# Altium schematic symbol library Altium_Library.SchLib: 822 symbols (part 11 of 17)
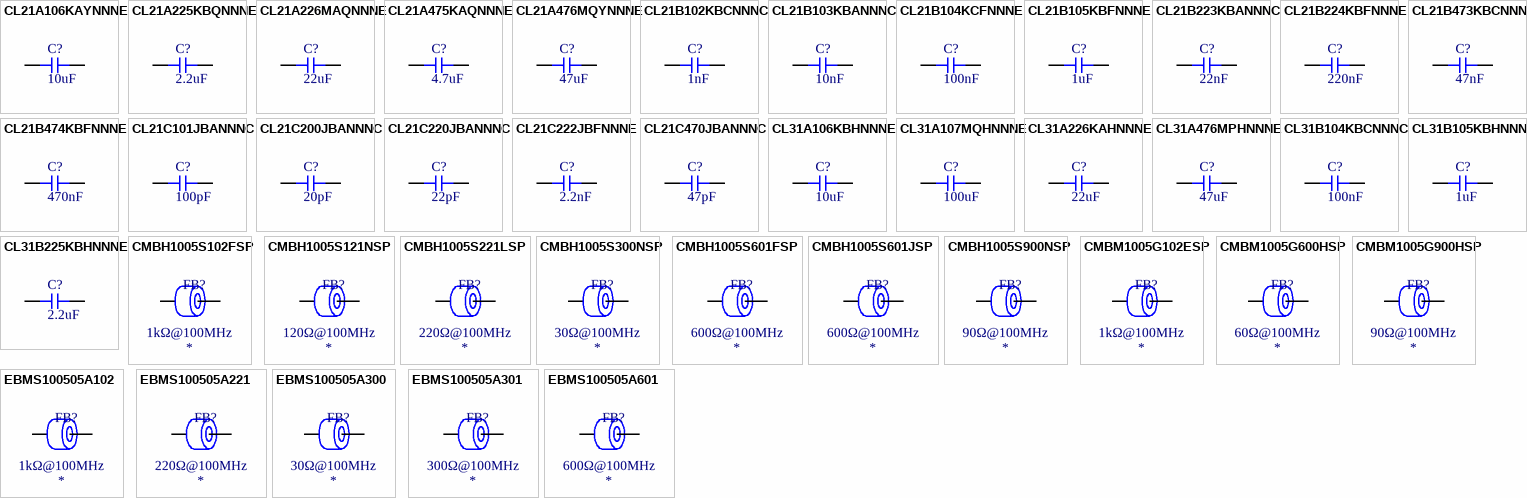
[diagram p30: symbols CL21A106KAYNNNE to EBMS100505A601]

## EBMS100505A102
designator FB?  Impedance @ Frequency: 1kΩ@100MHz
Ferrite, 1kΩ@100MHz, ±25%, 1Ω, 200mA, SMD 0402; Manufacturer: HYHONGYEX; Manufacturer Part Number: EBMS100505A102; Package Size: 0402; JLCPCB Basic Part: No; JLCPCB Part Number: C963843; Supplier 1: LCSC; Category: Ferrite Beads; Supplier Part Number 1: C963843; Tolerance: ±25%; Rated Current: 200mA; DC Resistance: 1Ω; RoHS: Yes; ComponentLink1Description: Datasheet; ComponentLink1URL: https://wmsc.lcsc.com/wmsc/upload/file/pdf/v2/lcsc/2304140030_HYHONGYEX-EBMS100505A102_C963843.pdf; ComponentLink2Description: JLCPCB Part URL; ComponentLink2URL: https://jlcpcb.com/partdetail/C963843; ComponentLink3Description: LCSC Part URL; ComponentLink3URL: https://lcsc.com/product-detail/Ferrite-Beads_HYHONGYEX-HYHONGYEX-EBMS100505A102_C963843.html
footprint FB-0402 (0402 (1005M) Ferrite)
pins: 1, 2

## EBMS100505A221
designator FB?  Impedance @ Frequency: 220Ω@100MHz
Ferrite, 220Ω@100MHz, ±25%, 700mΩ, 300mA, SMD 0402; Manufacturer: HYHONGYEX; Manufacturer Part Number: EBMS100505A221; Package Size: 0402; JLCPCB Basic Part: No; JLCPCB Part Number: C963840; Supplier 1: LCSC; Category: Ferrite Beads; Supplier Part Number 1: C963840; Tolerance: ±25%; Rated Current: 300mA; DC Resistance: 700mΩ; RoHS: Yes; ComponentLink1Description: Datasheet; ComponentLink1URL: https://wmsc.lcsc.com/wmsc/upload/file/pdf/v2/lcsc/2304140030_HYHONGYEX-EBMS100505A221_C963840.pdf; ComponentLink2Description: JLCPCB Part URL; ComponentLink2URL: https://jlcpcb.com/partdetail/C963840; ComponentLink3Description: LCSC Part URL; ComponentLink3URL: https://lcsc.com/product-detail/Ferrite-Beads_HYHONGYEX-HYHONGYEX-EBMS100505A221_C963840.html
footprint FB-0402 (0402 (1005M) Ferrite)
pins: 1, 2

## EBMS100505A300
designator FB?  Impedance @ Frequency: 30Ω@100MHz
Ferrite, 30Ω@100MHz, ±25%, 200mΩ, 300mA, SMD 0402; Manufacturer: HYHONGYEX; Manufacturer Part Number: EBMS100505A300; Package Size: 0402; JLCPCB Basic Part: No; JLCPCB Part Number: C963837; Supplier 1: LCSC; Category: Ferrite Beads; Supplier Part Number 1: C963837; Tolerance: ±25%; Rated Current: 300mA; DC Resistance: 200mΩ; RoHS: Yes; ComponentLink1Description: Datasheet; ComponentLink1URL: https://wmsc.lcsc.com/wmsc/upload/file/pdf/v2/lcsc/2304140030_HYHONGYEX-EBMS100505A300_C963837.pdf; ComponentLink2Description: JLCPCB Part URL; ComponentLink2URL: https://jlcpcb.com/partdetail/C963837; ComponentLink3Description: LCSC Part URL; ComponentLink3URL: https://lcsc.com/product-detail/Ferrite-Beads_HYHONGYEX-HYHONGYEX-EBMS100505A300_C963837.html
footprint FB-0402 (0402 (1005M) Ferrite)
pins: 1, 2

## EBMS100505A301
designator FB?  Impedance @ Frequency: 300Ω@100MHz
Ferrite, 300Ω@100MHz, ±25%, 800mΩ, 200mA, SMD 0402; Manufacturer: HYHONGYEX; Manufacturer Part Number: EBMS100505A301; Package Size: 0402; JLCPCB Basic Part: No; JLCPCB Part Number: C963841; Supplier 1: LCSC; Category: Ferrite Beads; Supplier Part Number 1: C963841; Tolerance: ±25%; Rated Current: 200mA; DC Resistance: 800mΩ; RoHS: Yes; ComponentLink1Description: Datasheet; ComponentLink1URL: https://wmsc.lcsc.com/wmsc/upload/file/pdf/v2/lcsc/2304140030_HYHONGYEX-EBMS100505A301_C963841.pdf; ComponentLink2Description: JLCPCB Part URL; ComponentLink2URL: https://jlcpcb.com/partdetail/C963841; ComponentLink3Description: LCSC Part URL; ComponentLink3URL: https://lcsc.com/product-detail/Ferrite-Beads_HYHONGYEX-HYHONGYEX-EBMS100505A301_C963841.html
footprint FB-0402 (0402 (1005M) Ferrite)
pins: 1, 2

## EBMS100505A601
designator FB?  Impedance @ Frequency: 600Ω@100MHz
Ferrite, 600Ω@100MHz, ±25%, 1Ω, 300mA, SMD 0402; Manufacturer: HYHONGYEX; Manufacturer Part Number: EBMS100505A601; Package Size: 0402; JLCPCB Basic Part: No; JLCPCB Part Number: C963842; Supplier 1: LCSC; Category: Ferrite Beads; Supplier Part Number 1: C963842; Tolerance: ±25%; Rated Current: 300mA; DC Resistance: 1Ω; RoHS: Yes; ComponentLink1Description: Datasheet; ComponentLink1URL: https://wmsc.lcsc.com/wmsc/upload/file/pdf/v2/lcsc/2304140030_HYHONGYEX-EBMS100505A601_C963842.pdf; ComponentLink2Description: JLCPCB Part URL; ComponentLink2URL: https://jlcpcb.com/partdetail/C963842; ComponentLink3Description: LCSC Part URL; ComponentLink3URL: https://lcsc.com/product-detail/Ferrite-Beads_HYHONGYEX-HYHONGYEX-EBMS100505A601_C963842.html
footprint FB-0402 (0402 (1005M) Ferrite)
pins: 1, 2

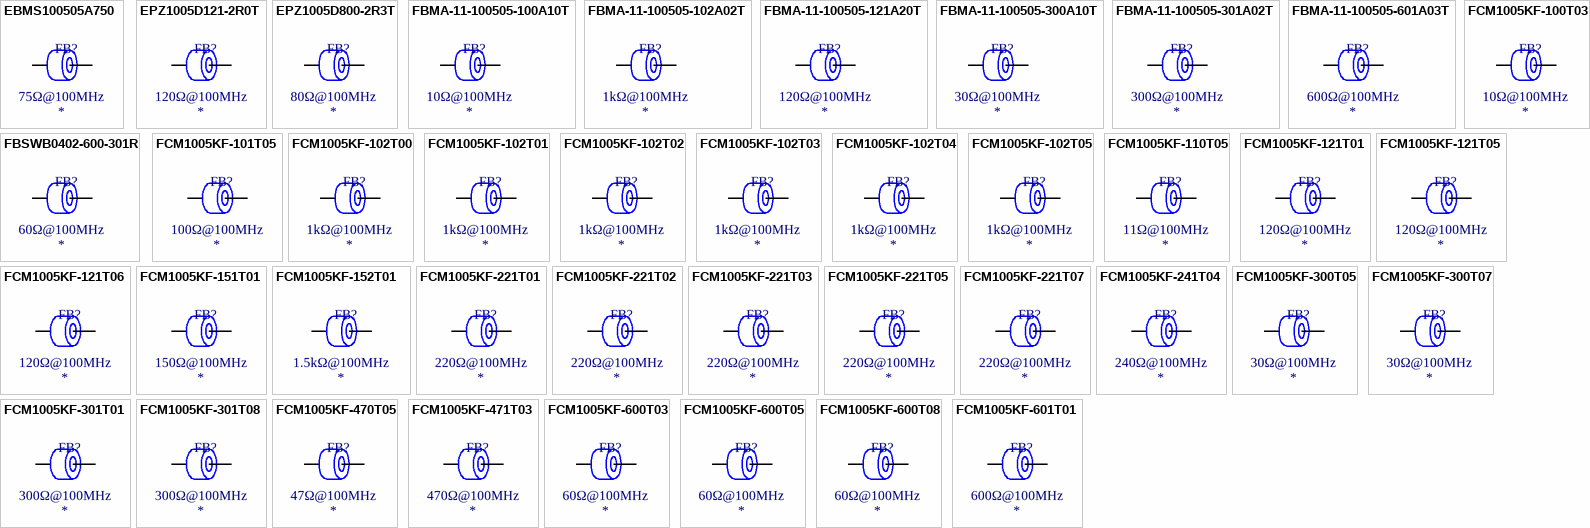
[diagram p12: symbols EBMS100505A750 to FCM1005KF-601T01]

## EBMS100505A750
designator FB?  Impedance @ Frequency: 75Ω@100MHz
Ferrite, 75Ω@100MHz, ±25%, 250mΩ, 300mA, SMD 0402; Manufacturer: HYHONGYEX; Manufacturer Part Number: EBMS100505A750; Package Size: 0402; JLCPCB Basic Part: No; JLCPCB Part Number: C963838; Supplier 1: LCSC; Category: Ferrite Beads; Supplier Part Number 1: C963838; Tolerance: ±25%; Rated Current: 300mA; DC Resistance: 250mΩ; RoHS: Yes; ComponentLink1Description: Datasheet; ComponentLink1URL: https://wmsc.lcsc.com/wmsc/upload/file/pdf/v2/lcsc/2304140030_HYHONGYEX-EBMS100505A750_C963838.pdf; ComponentLink2Description: JLCPCB Part URL; ComponentLink2URL: https://jlcpcb.com/partdetail/C963838; ComponentLink3Description: LCSC Part URL; ComponentLink3URL: https://lcsc.com/product-detail/Ferrite-Beads_HYHONGYEX-HYHONGYEX-EBMS100505A750_C963838.html
footprint FB-0402 (0402 (1005M) Ferrite)
pins: 1, 2

## EPZ1005D121-2R0T
designator FB?  Impedance @ Frequency: 120Ω@100MHz
Ferrite, 120Ω@100MHz, ±25%, 50mΩ, 2A, SMD 0402; Manufacturer: Sunlord; Manufacturer Part Number: EPZ1005D121-2R0T; Package Size: 0402; JLCPCB Basic Part: No; JLCPCB Part Number: C2994658; Supplier 1: LCSC; Category: Ferrite Beads; Supplier Part Number 1: C2994658; Tolerance: ±25%; Rated Current: 2A; DC Resistance: 50mΩ; RoHS: Yes; ComponentLink1Description: Datasheet; ComponentLink1URL: https://wmsc.lcsc.com/wmsc/upload/file/pdf/v2/lcsc/2310301452_Sunlord-EPZ1005D121-2R0T_C2994658.pdf; ComponentLink2Description: JLCPCB Part URL; ComponentLink2URL: https://jlcpcb.com/partdetail/C2994658; ComponentLink3Description: LCSC Part URL; ComponentLink3URL: https://lcsc.com/product-detail/Ferrite-Beads_Sunlord-Sunlord-EPZ1005D121-2R0T_C2994658.html
footprint FB-0402 (0402 (1005M) Ferrite)
pins: 1, 2

## EPZ1005D800-2R3T
designator FB?  Impedance @ Frequency: 80Ω@100MHz
Ferrite, 80Ω@100MHz, ±25%, 38mΩ, 2.3A, SMD 0402; Manufacturer: Sunlord; Manufacturer Part Number: EPZ1005D800-2R3T; Package Size: 0402; JLCPCB Basic Part: No; JLCPCB Part Number: C2992329; Supplier 1: LCSC; Category: Ferrite Beads; Supplier Part Number 1: C2992329; Tolerance: ±25%; Rated Current: 2.3A; DC Resistance: 38mΩ; RoHS: Yes; ComponentLink1Description: Datasheet; ComponentLink1URL: https://wmsc.lcsc.com/wmsc/upload/file/pdf/v2/lcsc/2310301640_Sunlord-EPZ1005D800-2R3T_C2992329.pdf; ComponentLink2Description: JLCPCB Part URL; ComponentLink2URL: https://jlcpcb.com/partdetail/C2992329; ComponentLink3Description: LCSC Part URL; ComponentLink3URL: https://lcsc.com/product-detail/Ferrite-Beads_Sunlord-Sunlord-EPZ1005D800-2R3T_C2992329.html
footprint FB-0402 (0402 (1005M) Ferrite)
pins: 1, 2

## FBMA-11-100505-100A10T
designator FB?  Impedance @ Frequency: 10Ω@100MHz
Ferrite, 10Ω@100MHz, ±25%, 200mΩ, 1A, SMD 0402; Manufacturer: Kingcore; Manufacturer Part Number: FBMA-11-100505-100A10T; Package Size: 0402; JLCPCB Basic Part: No; JLCPCB Part Number: C491479; Supplier 1: LCSC; Category: Ferrite Beads; Supplier Part Number 1: C491479; Tolerance: ±25%; Rated Current: 1A; DC Resistance: 200mΩ; RoHS: Yes; ComponentLink1Description: Datasheet; ComponentLink1URL: https://datasheet.lcsc.com/lcsc/2003182011_Kingcore-FBMA-11-100505-100A10T_C491479.pdf; ComponentLink2Description: JLCPCB Part URL; ComponentLink2URL: https://jlcpcb.com/partdetail/C491479; ComponentLink3Description: LCSC Part URL; ComponentLink3URL: https://lcsc.com/product-detail/Ferrite-Beads_Kingcore-Kingcore-FBMA-11-100505-100A10T_C491479.html
footprint FB-0402 (0402 (1005M) Ferrite)
pins: 1, 2

## FBMA-11-100505-102A02T
designator FB?  Impedance @ Frequency: 1kΩ@100MHz
Ferrite, 1kΩ@100MHz, ±25%, 800mΩ, 200mA, SMD 0402; Manufacturer: Kingcore; Manufacturer Part Number: FBMA-11-100505-102A02T; Package Size: 0402; JLCPCB Basic Part: No; JLCPCB Part Number: C491491; Supplier 1: LCSC; Category: Ferrite Beads; Supplier Part Number 1: C491491; Tolerance: ±25%; Rated Current: 200mA; DC Resistance: 800mΩ; RoHS: Yes; ComponentLink1Description: Datasheet; ComponentLink1URL: https://datasheet.lcsc.com/lcsc/2003182011_Kingcore-FBMA-11-100505-102A02T_C491491.pdf; ComponentLink2Description: JLCPCB Part URL; ComponentLink2URL: https://jlcpcb.com/partdetail/C491491; ComponentLink3Description: LCSC Part URL; ComponentLink3URL: https://lcsc.com/product-detail/Ferrite-Beads_Kingcore-Kingcore-FBMA-11-100505-102A02T_C491491.html
footprint FB-0402 (0402 (1005M) Ferrite)
pins: 1, 2

## FBMA-11-100505-121A20T
designator FB?  Impedance @ Frequency: 120Ω@100MHz
Ferrite, 120Ω@100MHz, ±25%, 100mΩ, 2A, SMD 0402; Manufacturer: Kingcore; Manufacturer Part Number: FBMA-11-100505-121A20T; Package Size: 0402; JLCPCB Basic Part: No; JLCPCB Part Number: C491487; Supplier 1: LCSC; Category: Ferrite Beads; Supplier Part Number 1: C491487; Tolerance: ±25%; Rated Current: 2A; DC Resistance: 100mΩ; RoHS: Yes; ComponentLink1Description: Datasheet; ComponentLink1URL: https://datasheet.lcsc.com/lcsc/2003182011_Kingcore-FBMA-11-100505-121A20T_C491487.pdf; ComponentLink2Description: JLCPCB Part URL; ComponentLink2URL: https://jlcpcb.com/partdetail/C491487; ComponentLink3Description: LCSC Part URL; ComponentLink3URL: https://lcsc.com/product-detail/Ferrite-Beads_Kingcore-Kingcore-FBMA-11-100505-121A20T_C491487.html
footprint FB-0402 (0402 (1005M) Ferrite)
pins: 1, 2

## FBMA-11-100505-300A10T
designator FB?  Impedance @ Frequency: 30Ω@100MHz
Ferrite, 30Ω@100MHz, ±25%, 200mΩ, 1A, SMD 0402; Manufacturer: Kingcore; Manufacturer Part Number: FBMA-11-100505-300A10T; Package Size: 0402; JLCPCB Basic Part: No; JLCPCB Part Number: C491481; Supplier 1: LCSC; Category: Ferrite Beads; Supplier Part Number 1: C491481; Tolerance: ±25%; Rated Current: 1A; DC Resistance: 200mΩ; RoHS: Yes; ComponentLink1Description: Datasheet; ComponentLink1URL: https://datasheet.lcsc.com/lcsc/2003182011_Kingcore-FBMA-11-100505-300A10T_C491481.pdf; ComponentLink2Description: JLCPCB Part URL; ComponentLink2URL: https://jlcpcb.com/partdetail/C491481; ComponentLink3Description: LCSC Part URL; ComponentLink3URL: https://lcsc.com/product-detail/Ferrite-Beads_Kingcore-Kingcore-FBMA-11-100505-300A10T_C491481.html
footprint FB-0402 (0402 (1005M) Ferrite)
pins: 1, 2

## FBMA-11-100505-301A02T
designator FB?  Impedance @ Frequency: 300Ω@100MHz
Ferrite, 300Ω@100MHz, ±25%, 600mΩ, 200mA, SMD 0402; Manufacturer: Kingcore; Manufacturer Part Number: FBMA-11-100505-301A02T; Package Size: 0402; JLCPCB Basic Part: No; JLCPCB Part Number: C491489; Supplier 1: LCSC; Category: Ferrite Beads; Supplier Part Number 1: C491489; Tolerance: ±25%; Rated Current: 200mA; DC Resistance: 600mΩ; RoHS: Yes; ComponentLink1Description: Datasheet; ComponentLink1URL: https://datasheet.lcsc.com/lcsc/2003182011_Kingcore-FBMA-11-100505-301A02T_C491489.pdf; ComponentLink2Description: JLCPCB Part URL; ComponentLink2URL: https://jlcpcb.com/partdetail/C491489; ComponentLink3Description: LCSC Part URL; ComponentLink3URL: https://lcsc.com/product-detail/Ferrite-Beads_Kingcore-Kingcore-FBMA-11-100505-301A02T_C491489.html
footprint FB-0402 (0402 (1005M) Ferrite)
pins: 1, 2

## FBMA-11-100505-601A03T
designator FB?  Impedance @ Frequency: 600Ω@100MHz
Ferrite, 600Ω@100MHz, ±25%, 500mΩ, 300mA, SMD 0402; Manufacturer: Kingcore; Manufacturer Part Number: FBMA-11-100505-601A03T; Package Size: 0402; JLCPCB Basic Part: No; JLCPCB Part Number: C491490; Supplier 1: LCSC; Category: Ferrite Beads; Supplier Part Number 1: C491490; Tolerance: ±25%; Rated Current: 300mA; DC Resistance: 500mΩ; RoHS: Yes; ComponentLink1Description: Datasheet; ComponentLink1URL: https://datasheet.lcsc.com/lcsc/2003182011_Kingcore-FBMA-11-100505-601A03T_C491490.pdf; ComponentLink2Description: JLCPCB Part URL; ComponentLink2URL: https://jlcpcb.com/partdetail/C491490; ComponentLink3Description: LCSC Part URL; ComponentLink3URL: https://lcsc.com/product-detail/Ferrite-Beads_Kingcore-Kingcore-FBMA-11-100505-601A03T_C491490.html
footprint FB-0402 (0402 (1005M) Ferrite)
pins: 1, 2

## FBSWB0402-600-301R
designator FB?  Impedance @ Frequency: 60Ω@100MHz
Ferrite, 60Ω@100MHz, ±25%, 200mΩ, 300mA, SMD 0402; Manufacturer: KOHERelec; Manufacturer Part Number: FBSWB0402-600-301R; Package Size: 0402; JLCPCB Basic Part: No; JLCPCB Part Number: C2922543; Supplier 1: LCSC; Category: Ferrite Beads; Supplier Part Number 1: C2922543; Tolerance: ±25%; Rated Current: 300mA; DC Resistance: 200mΩ; RoHS: Yes; ComponentLink1Description: Datasheet; ComponentLink1URL: https://wmsc.lcsc.com/wmsc/upload/file/pdf/v2/lcsc/2201121300_KOHERelec-FBSWB0402-600-301R_C2922543.pdf; ComponentLink2Description: JLCPCB Part URL; ComponentLink2URL: https://jlcpcb.com/partdetail/C2922543; ComponentLink3Description: LCSC Part URL; ComponentLink3URL: https://lcsc.com/product-detail/Ferrite-Beads_KOHERelec-KOHERelec-FBSWB0402-600-301R_C2922543.html
footprint FB-0402 (0402 (1005M) Ferrite)
pins: 1, 2

## FCM1005KF-100T03
designator FB?  Impedance @ Frequency: 10Ω@100MHz
Ferrite, 10Ω@100MHz, ±25%, 200mΩ, 300mA, SMD 0402; Manufacturer: TAI-TECH; Manufacturer Part Number: FCM1005KF-100T03; Package Size: 0402; JLCPCB Basic Part: No; JLCPCB Part Number: C356928; Supplier 1: LCSC; Category: Ferrite Beads; Supplier Part Number 1: C356928; Tolerance: ±25%; Rated Current: 300mA; DC Resistance: 200mΩ; RoHS: Yes; ComponentLink1Description: Datasheet; ComponentLink1URL: https://wmsc.lcsc.com/wmsc/upload/file/pdf/v2/lcsc/2009171137_TAI-TECH-FCM1005KF-100T03_C356928.pdf; ComponentLink2Description: JLCPCB Part URL; ComponentLink2URL: https://jlcpcb.com/partdetail/C356928; ComponentLink3Description: LCSC Part URL; ComponentLink3URL: https://lcsc.com/product-detail/Ferrite-Beads_TAI-TECH-TAI-TECH-FCM1005KF-100T03_C356928.html
footprint FB-0402 (0402 (1005M) Ferrite)
pins: 1, 2

## FCM1005KF-101T05
designator FB?  Impedance @ Frequency: 100Ω@100MHz
Ferrite, 100Ω@100MHz, ±25%, 300mΩ, 500mA, SMD 0402; Manufacturer: TAI-TECH; Manufacturer Part Number: FCM1005KF-101T05; Package Size: 0402; JLCPCB Basic Part: No; JLCPCB Part Number: C369534; Supplier 1: LCSC; Category: Ferrite Beads; Supplier Part Number 1: C369534; Tolerance: ±25%; Rated Current: 500mA; DC Resistance: 300mΩ; RoHS: Yes; ComponentLink1Description: Datasheet; ComponentLink1URL: https://wmsc.lcsc.com/wmsc/upload/file/pdf/v2/lcsc/2009171441_TAI-TECH-FCM1005KF-101T05_C369534.pdf; ComponentLink2Description: JLCPCB Part URL; ComponentLink2URL: https://jlcpcb.com/partdetail/C369534; ComponentLink3Description: LCSC Part URL; ComponentLink3URL: https://lcsc.com/product-detail/Ferrite-Beads_TAI-TECH-TAI-TECH-FCM1005KF-101T05_C369534.html
footprint FB-0402 (0402 (1005M) Ferrite)
pins: 1, 2

## FCM1005KF-102T00
designator FB?  Impedance @ Frequency: 1kΩ@100MHz
Ferrite, 1kΩ@100MHz, ±25%, 1.2Ω, 50mA, SMD 0402; Manufacturer: TAI-TECH; Manufacturer Part Number: FCM1005KF-102T00; Package Size: 0402; JLCPCB Basic Part: No; JLCPCB Part Number: C155041; Supplier 1: LCSC; Category: Ferrite Beads; Supplier Part Number 1: C155041; Tolerance: ±25%; Rated Current: 50mA; DC Resistance: 1.2Ω; RoHS: Yes; ComponentLink1Description: Datasheet; ComponentLink1URL: https://wmsc.lcsc.com/wmsc/upload/file/pdf/v2/lcsc/2009171306_TAI-TECH-FCM1005KF-102T00_C155041.pdf; ComponentLink2Description: JLCPCB Part URL; ComponentLink2URL: https://jlcpcb.com/partdetail/C155041; ComponentLink3Description: LCSC Part URL; ComponentLink3URL: https://lcsc.com/product-detail/Ferrite-Beads_TAI-TECH-TAI-TECH-FCM1005KF-102T00_C155041.html
footprint FB-0402 (0402 (1005M) Ferrite)
pins: 1, 2

## FCM1005KF-102T01
designator FB?  Impedance @ Frequency: 1kΩ@100MHz
Ferrite, 1kΩ@100MHz, ±25%, 1.3Ω, 100mA, SMD 0402; Manufacturer: TAI-TECH; Manufacturer Part Number: FCM1005KF-102T01; Package Size: 0402; JLCPCB Basic Part: No; JLCPCB Part Number: C356929; Supplier 1: LCSC; Category: Ferrite Beads; Supplier Part Number 1: C356929; Tolerance: ±25%; Rated Current: 100mA; DC Resistance: 1.3Ω; RoHS: Yes; ComponentLink1Description: Datasheet; ComponentLink1URL: https://wmsc.lcsc.com/wmsc/upload/file/pdf/v2/lcsc/2009171137_TAI-TECH-FCM1005KF-102T01_C356929.pdf; ComponentLink2Description: JLCPCB Part URL; ComponentLink2URL: https://jlcpcb.com/partdetail/C356929; ComponentLink3Description: LCSC Part URL; ComponentLink3URL: https://lcsc.com/product-detail/Ferrite-Beads_TAI-TECH-TAI-TECH-FCM1005KF-102T01_C356929.html
footprint FB-0402 (0402 (1005M) Ferrite)
pins: 1, 2

## FCM1005KF-102T02
designator FB?  Impedance @ Frequency: 1kΩ@100MHz
Ferrite, 1kΩ@100MHz, ±25%, 900mΩ, 200mA, SMD 0402; Manufacturer: TAI-TECH; Manufacturer Part Number: FCM1005KF-102T02; Package Size: 0402; JLCPCB Basic Part: No; JLCPCB Part Number: C356930; Supplier 1: LCSC; Category: Ferrite Beads; Supplier Part Number 1: C356930; Tolerance: ±25%; Rated Current: 200mA; DC Resistance: 900mΩ; RoHS: Yes; ComponentLink1Description: Datasheet; ComponentLink1URL: https://wmsc.lcsc.com/wmsc/upload/file/pdf/v2/lcsc/2009171137_TAI-TECH-FCM1005KF-102T02_C356930.pdf; ComponentLink2Description: JLCPCB Part URL; ComponentLink2URL: https://jlcpcb.com/partdetail/C356930; ComponentLink3Description: LCSC Part URL; ComponentLink3URL: https://lcsc.com/product-detail/Ferrite-Beads_TAI-TECH-TAI-TECH-FCM1005KF-102T02_C356930.html
footprint FB-0402 (0402 (1005M) Ferrite)
pins: 1, 2

## FCM1005KF-102T03
designator FB?  Impedance @ Frequency: 1kΩ@100MHz
Ferrite, 1kΩ@100MHz, ±25%, 1.2Ω, 300mA, SMD 0402; Manufacturer: TAI-TECH; Manufacturer Part Number: FCM1005KF-102T03; Package Size: 0402; JLCPCB Basic Part: No; JLCPCB Part Number: C369535; Supplier 1: LCSC; Category: Ferrite Beads; Supplier Part Number 1: C369535; Tolerance: ±25%; Rated Current: 300mA; DC Resistance: 1.2Ω; RoHS: Yes; ComponentLink1Description: Datasheet; ComponentLink1URL: https://wmsc.lcsc.com/wmsc/upload/file/pdf/v2/lcsc/2009171441_TAI-TECH-FCM1005KF-102T03_C369535.pdf; ComponentLink2Description: JLCPCB Part URL; ComponentLink2URL: https://jlcpcb.com/partdetail/C369535; ComponentLink3Description: LCSC Part URL; ComponentLink3URL: https://lcsc.com/product-detail/Ferrite-Beads_TAI-TECH-TAI-TECH-FCM1005KF-102T03_C369535.html
footprint FB-0402 (0402 (1005M) Ferrite)
pins: 1, 2

## FCM1005KF-102T04
designator FB?  Impedance @ Frequency: 1kΩ@100MHz
Ferrite, 1kΩ@100MHz, ±25%, 1.1Ω, 400mA, SMD 0402; Manufacturer: TAI-TECH; Manufacturer Part Number: FCM1005KF-102T04; Package Size: 0402; JLCPCB Basic Part: No; JLCPCB Part Number: C304239; Supplier 1: LCSC; Category: Ferrite Beads; Supplier Part Number 1: C304239; Tolerance: ±25%; Rated Current: 400mA; DC Resistance: 1.1Ω; RoHS: Yes; ComponentLink1Description: Datasheet; ComponentLink1URL: https://wmsc.lcsc.com/wmsc/upload/file/pdf/v2/lcsc/2009171409_TAI-TECH-FCM1005KF-102T04_C304239.pdf; ComponentLink2Description: JLCPCB Part URL; ComponentLink2URL: https://jlcpcb.com/partdetail/C304239; ComponentLink3Description: LCSC Part URL; ComponentLink3URL: https://lcsc.com/product-detail/Ferrite-Beads_TAI-TECH-TAI-TECH-FCM1005KF-102T04_C304239.html
footprint FB-0402 (0402 (1005M) Ferrite)
pins: 1, 2

## FCM1005KF-102T05
designator FB?  Impedance @ Frequency: 1kΩ@100MHz
Ferrite, 1kΩ@100MHz, ±25%, 1.2Ω, 500mA, SMD 0402; Manufacturer: TAI-TECH; Manufacturer Part Number: FCM1005KF-102T05; Package Size: 0402; JLCPCB Basic Part: No; JLCPCB Part Number: C2880096; Supplier 1: LCSC; Category: Ferrite Beads; Supplier Part Number 1: C2880096; Tolerance: ±25%; Rated Current: 500mA; DC Resistance: 1.2Ω; RoHS: Yes; ComponentLink1Description: Datasheet; ComponentLink1URL: https://wmsc.lcsc.com/wmsc/upload/file/pdf/v2/lcsc/2108241130_TAI-TECH-FCM1005KF-102T05_C2880096.pdf; ComponentLink2Description: JLCPCB Part URL; ComponentLink2URL: https://jlcpcb.com/partdetail/C2880096; ComponentLink3Description: LCSC Part URL; ComponentLink3URL: https://lcsc.com/product-detail/Ferrite-Beads_TAI-TECH-TAI-TECH-FCM1005KF-102T05_C2880096.html
footprint FB-0402 (0402 (1005M) Ferrite)
pins: 1, 2

## FCM1005KF-110T05
designator FB?  Impedance @ Frequency: 11Ω@100MHz
Ferrite, 11Ω@100MHz, ±25%, 500mA, SMD 0402; Manufacturer: TAI-TECH; Manufacturer Part Number: FCM1005KF-110T05; Package Size: 0402; JLCPCB Basic Part: No; JLCPCB Part Number: C304240; Supplier 1: LCSC; Category: Ferrite Beads; Supplier Part Number 1: C304240; Tolerance: ±25%; Rated Current: 500mA; RoHS: Yes; ComponentLink1Description: Datasheet; ComponentLink1URL: https://wmsc.lcsc.com/wmsc/upload/file/pdf/v2/lcsc/2009171409_TAI-TECH-FCM1005KF-110T05_C304240.pdf; ComponentLink2Description: JLCPCB Part URL; ComponentLink2URL: https://jlcpcb.com/partdetail/C304240; ComponentLink3Description: LCSC Part URL; ComponentLink3URL: https://lcsc.com/product-detail/Ferrite-Beads_TAI-TECH-TAI-TECH-FCM1005KF-110T05_C304240.html
footprint FB-0402 (0402 (1005M) Ferrite)
pins: 1, 2

## FCM1005KF-121T01
designator FB?  Impedance @ Frequency: 120Ω@100MHz
Ferrite, 120Ω@100MHz, ±25%, 300mΩ, 100mA, SMD 0402; Manufacturer: TAI-TECH; Manufacturer Part Number: FCM1005KF-121T01; Package Size: 0402; JLCPCB Basic Part: No; JLCPCB Part Number: C155042; Supplier 1: LCSC; Category: Ferrite Beads; Supplier Part Number 1: C155042; Tolerance: ±25%; Rated Current: 100mA; DC Resistance: 300mΩ; RoHS: Yes; ComponentLink1Description: Datasheet; ComponentLink1URL: https://wmsc.lcsc.com/wmsc/upload/file/pdf/v2/lcsc/2009171306_TAI-TECH-FCM1005KF-121T01_C155042.pdf; ComponentLink2Description: JLCPCB Part URL; ComponentLink2URL: https://jlcpcb.com/partdetail/C155042; ComponentLink3Description: LCSC Part URL; ComponentLink3URL: https://lcsc.com/product-detail/Ferrite-Beads_TAI-TECH-TAI-TECH-FCM1005KF-121T01_C155042.html
footprint FB-0402 (0402 (1005M) Ferrite)
pins: 1, 2

## FCM1005KF-121T05
designator FB?  Impedance @ Frequency: 120Ω@100MHz
Ferrite, 120Ω@100MHz, ±25%, 300mΩ, 500mA, SMD 0402; Manufacturer: TAI-TECH; Manufacturer Part Number: FCM1005KF-121T05; Package Size: 0402; JLCPCB Basic Part: No; JLCPCB Part Number: C133927; Supplier 1: LCSC; Category: Ferrite Beads; Supplier Part Number 1: C133927; Tolerance: ±25%; Rated Current: 500mA; DC Resistance: 300mΩ; RoHS: Yes; ComponentLink1Description: Datasheet; ComponentLink1URL: https://wmsc.lcsc.com/wmsc/upload/file/pdf/v2/lcsc/2009171304_TAI-TECH-FCM1005KF-121T05_C133927.pdf; ComponentLink2Description: JLCPCB Part URL; ComponentLink2URL: https://jlcpcb.com/partdetail/C133927; ComponentLink3Description: LCSC Part URL; ComponentLink3URL: https://lcsc.com/product-detail/Ferrite-Beads_TAI-TECH-TAI-TECH-FCM1005KF-121T05_C133927.html
footprint FB-0402 (0402 (1005M) Ferrite)
pins: 1, 2

## FCM1005KF-121T06
designator FB?  Impedance @ Frequency: 120Ω@100MHz
Ferrite, 120Ω@100MHz, ±25%, 300mΩ, 600mA, SMD 0402; Manufacturer: TAI-TECH; Manufacturer Part Number: FCM1005KF-121T06; Package Size: 0402; JLCPCB Basic Part: No; JLCPCB Part Number: C304241; Supplier 1: LCSC; Category: Ferrite Beads; Supplier Part Number 1: C304241; Tolerance: ±25%; Rated Current: 600mA; DC Resistance: 300mΩ; RoHS: Yes; ComponentLink1Description: Datasheet; ComponentLink1URL: https://wmsc.lcsc.com/wmsc/upload/file/pdf/v2/lcsc/2009171409_TAI-TECH-FCM1005KF-121T06_C304241.pdf; ComponentLink2Description: JLCPCB Part URL; ComponentLink2URL: https://jlcpcb.com/partdetail/C304241; ComponentLink3Description: LCSC Part URL; ComponentLink3URL: https://lcsc.com/product-detail/Ferrite-Beads_TAI-TECH-TAI-TECH-FCM1005KF-121T06_C304241.html
footprint FB-0402 (0402 (1005M) Ferrite)
pins: 1, 2

## FCM1005KF-151T01
designator FB?  Impedance @ Frequency: 150Ω@100MHz
Ferrite, 150Ω@100MHz, ±25%, 300mΩ, 100mA, SMD 0402; Manufacturer: TAI-TECH; Manufacturer Part Number: FCM1005KF-151T01; Package Size: 0402; JLCPCB Basic Part: No; JLCPCB Part Number: C155043; Supplier 1: LCSC; Category: Ferrite Beads; Supplier Part Number 1: C155043; Tolerance: ±25%; Rated Current: 100mA; DC Resistance: 300mΩ; RoHS: Yes; ComponentLink1Description: Datasheet; ComponentLink1URL: https://wmsc.lcsc.com/wmsc/upload/file/pdf/v2/lcsc/2009171306_TAI-TECH-FCM1005KF-151T01_C155043.pdf; ComponentLink2Description: JLCPCB Part URL; ComponentLink2URL: https://jlcpcb.com/partdetail/C155043; ComponentLink3Description: LCSC Part URL; ComponentLink3URL: https://lcsc.com/product-detail/Ferrite-Beads_TAI-TECH-TAI-TECH-FCM1005KF-151T01_C155043.html
footprint FB-0402 (0402 (1005M) Ferrite)
pins: 1, 2

## FCM1005KF-152T01
designator FB?  Impedance @ Frequency: 1.5kΩ@100MHz
Ferrite, 1.5kΩ@100MHz, ±25%, 1.3Ω, 100mA, SMD 0402; Manufacturer: TAI-TECH; Manufacturer Part Number: FCM1005KF-152T01; Package Size: 0402; JLCPCB Basic Part: No; JLCPCB Part Number: C2880095; Supplier 1: LCSC; Category: Ferrite Beads; Supplier Part Number 1: C2880095; Tolerance: ±25%; Rated Current: 100mA; DC Resistance: 1.3Ω; RoHS: Yes; ComponentLink1Description: Datasheet; ComponentLink1URL: https://wmsc.lcsc.com/wmsc/upload/file/pdf/v2/lcsc/2108241130_TAI-TECH-FCM1005KF-152T01_C2880095.pdf; ComponentLink2Description: JLCPCB Part URL; ComponentLink2URL: https://jlcpcb.com/partdetail/C2880095; ComponentLink3Description: LCSC Part URL; ComponentLink3URL: https://lcsc.com/product-detail/Ferrite-Beads_TAI-TECH-TAI-TECH-FCM1005KF-152T01_C2880095.html
footprint FB-0402 (0402 (1005M) Ferrite)
pins: 1, 2

## FCM1005KF-221T01
designator FB?  Impedance @ Frequency: 220Ω@100MHz
Ferrite, 220Ω@100MHz, ±25%, 400mΩ, 100mA, SMD 0402; Manufacturer: TAI-TECH; Manufacturer Part Number: FCM1005KF-221T01; Package Size: 0402; JLCPCB Basic Part: No; JLCPCB Part Number: C155044; Supplier 1: LCSC; Category: Ferrite Beads; Supplier Part Number 1: C155044; Tolerance: ±25%; Rated Current: 100mA; DC Resistance: 400mΩ; RoHS: Yes; ComponentLink1Description: Datasheet; ComponentLink1URL: https://wmsc.lcsc.com/wmsc/upload/file/pdf/v2/lcsc/2009171306_TAI-TECH-FCM1005KF-221T01_C155044.pdf; ComponentLink2Description: JLCPCB Part URL; ComponentLink2URL: https://jlcpcb.com/partdetail/C155044; ComponentLink3Description: LCSC Part URL; ComponentLink3URL: https://lcsc.com/product-detail/Ferrite-Beads_TAI-TECH-TAI-TECH-FCM1005KF-221T01_C155044.html
footprint FB-0402 (0402 (1005M) Ferrite)
pins: 1, 2

## FCM1005KF-221T02
designator FB?  Impedance @ Frequency: 220Ω@100MHz
Ferrite, 220Ω@100MHz, ±25%, 400mΩ, 200mA, SMD 0402; Manufacturer: TAI-TECH; Manufacturer Part Number: FCM1005KF-221T02; Package Size: 0402; JLCPCB Basic Part: No; JLCPCB Part Number: C525665; Supplier 1: LCSC; Category: Ferrite Beads; Supplier Part Number 1: C525665; Tolerance: ±25%; Rated Current: 200mA; DC Resistance: 400mΩ; RoHS: Yes; ComponentLink1Description: Datasheet; ComponentLink1URL: https://wmsc.lcsc.com/wmsc/upload/file/pdf/v2/lcsc/2009171442_TAI-TECH-FCM1005KF-221T02_C525665.pdf; ComponentLink2Description: JLCPCB Part URL; ComponentLink2URL: https://jlcpcb.com/partdetail/C525665; ComponentLink3Description: LCSC Part URL; ComponentLink3URL: https://lcsc.com/product-detail/Ferrite-Beads_TAI-TECH-TAI-TECH-FCM1005KF-221T02_C525665.html
footprint FB-0402 (0402 (1005M) Ferrite)
pins: 1, 2

## FCM1005KF-221T03
designator FB?  Impedance @ Frequency: 220Ω@100MHz
Ferrite, 220Ω@100MHz, ±25%, 400mΩ, 300mA, SMD 0402; Manufacturer: TAI-TECH; Manufacturer Part Number: FCM1005KF-221T03; Package Size: 0402; JLCPCB Basic Part: No; JLCPCB Part Number: C525666; Supplier 1: LCSC; Category: Ferrite Beads; Supplier Part Number 1: C525666; Tolerance: ±25%; Rated Current: 300mA; DC Resistance: 400mΩ; RoHS: Yes; ComponentLink1Description: Datasheet; ComponentLink1URL: https://wmsc.lcsc.com/wmsc/upload/file/pdf/v2/lcsc/2009171442_TAI-TECH-FCM1005KF-221T03_C525666.pdf; ComponentLink2Description: JLCPCB Part URL; ComponentLink2URL: https://jlcpcb.com/partdetail/C525666; ComponentLink3Description: LCSC Part URL; ComponentLink3URL: https://lcsc.com/product-detail/Ferrite-Beads_TAI-TECH-TAI-TECH-FCM1005KF-221T03_C525666.html
footprint FB-0402 (0402 (1005M) Ferrite)
pins: 1, 2

## FCM1005KF-221T05
designator FB?  Impedance @ Frequency: 220Ω@100MHz
Ferrite, 220Ω@100MHz, ±25%, 400mΩ, 500mA, SMD 0402; Manufacturer: TAI-TECH; Manufacturer Part Number: FCM1005KF-221T05; Package Size: 0402; JLCPCB Basic Part: No; JLCPCB Part Number: C356934; Supplier 1: LCSC; Category: Ferrite Beads; Supplier Part Number 1: C356934; Tolerance: ±25%; Rated Current: 500mA; DC Resistance: 400mΩ; RoHS: Yes; ComponentLink1Description: Datasheet; ComponentLink1URL: https://wmsc.lcsc.com/wmsc/upload/file/pdf/v2/lcsc/2009171137_TAI-TECH-FCM1005KF-221T05_C356934.pdf; ComponentLink2Description: JLCPCB Part URL; ComponentLink2URL: https://jlcpcb.com/partdetail/C356934; ComponentLink3Description: LCSC Part URL; ComponentLink3URL: https://lcsc.com/product-detail/Ferrite-Beads_TAI-TECH-TAI-TECH-FCM1005KF-221T05_C356934.html
footprint FB-0402 (0402 (1005M) Ferrite)
pins: 1, 2

## FCM1005KF-221T07
designator FB?  Impedance @ Frequency: 220Ω@100MHz
Ferrite, 220Ω@100MHz, ±25%, 400mΩ, 700mA, SMD 0402; Manufacturer: TAI-TECH; Manufacturer Part Number: FCM1005KF-221T07; Package Size: 0402; JLCPCB Basic Part: No; JLCPCB Part Number: C525667; Supplier 1: LCSC; Category: Ferrite Beads; Supplier Part Number 1: C525667; Tolerance: ±25%; Rated Current: 700mA; DC Resistance: 400mΩ; RoHS: Yes; ComponentLink1Description: Datasheet; ComponentLink1URL: https://wmsc.lcsc.com/wmsc/upload/file/pdf/v2/lcsc/2009171442_TAI-TECH-FCM1005KF-221T07_C525667.pdf; ComponentLink2Description: JLCPCB Part URL; ComponentLink2URL: https://jlcpcb.com/partdetail/C525667; ComponentLink3Description: LCSC Part URL; ComponentLink3URL: https://lcsc.com/product-detail/Ferrite-Beads_TAI-TECH-TAI-TECH-FCM1005KF-221T07_C525667.html
footprint FB-0402 (0402 (1005M) Ferrite)
pins: 1, 2

## FCM1005KF-241T04
designator FB?  Impedance @ Frequency: 240Ω@100MHz
Ferrite, 240Ω@100MHz, ±25%, 400mA, SMD 0402; Manufacturer: TAI-TECH; Manufacturer Part Number: FCM1005KF-241T04; Package Size: 0402; JLCPCB Basic Part: No; JLCPCB Part Number: C304243; Supplier 1: LCSC; Category: Ferrite Beads; Supplier Part Number 1: C304243; Tolerance: ±25%; Rated Current: 400mA; RoHS: Yes; ComponentLink1Description: Datasheet; ComponentLink1URL: https://wmsc.lcsc.com/wmsc/upload/file/pdf/v2/lcsc/2009171410_TAI-TECH-FCM1005KF-241T04_C304243.pdf; ComponentLink2Description: JLCPCB Part URL; ComponentLink2URL: https://jlcpcb.com/partdetail/C304243; ComponentLink3Description: LCSC Part URL; ComponentLink3URL: https://lcsc.com/product-detail/Ferrite-Beads_TAI-TECH-TAI-TECH-FCM1005KF-241T04_C304243.html
footprint FB-0402 (0402 (1005M) Ferrite)
pins: 1, 2

## FCM1005KF-300T05
designator FB?  Impedance @ Frequency: 30Ω@100MHz
Ferrite, 30Ω@100MHz, ±25%, 200mΩ, 500mA, SMD 0402; Manufacturer: TAI-TECH; Manufacturer Part Number: FCM1005KF-300T05; Package Size: 0402; JLCPCB Basic Part: No; JLCPCB Part Number: C2880092; Supplier 1: LCSC; Category: Ferrite Beads; Supplier Part Number 1: C2880092; Tolerance: ±25%; Rated Current: 500mA; DC Resistance: 200mΩ; RoHS: Yes; ComponentLink1Description: Datasheet; ComponentLink1URL: https://wmsc.lcsc.com/wmsc/upload/file/pdf/v2/lcsc/2108241130_TAI-TECH-FCM1005KF-300T05_C2880092.pdf; ComponentLink2Description: JLCPCB Part URL; ComponentLink2URL: https://jlcpcb.com/partdetail/C2880092; ComponentLink3Description: LCSC Part URL; ComponentLink3URL: https://lcsc.com/product-detail/Ferrite-Beads_TAI-TECH-TAI-TECH-FCM1005KF-300T05_C2880092.html
footprint FB-0402 (0402 (1005M) Ferrite)
pins: 1, 2

## FCM1005KF-300T07
designator FB?  Impedance @ Frequency: 30Ω@100MHz
Ferrite, 30Ω@100MHz, ±25%, 200mΩ, 300mA, SMD 0402; Manufacturer: TAI-TECH; Manufacturer Part Number: FCM1005KF-300T07; Package Size: 0402; JLCPCB Basic Part: No; JLCPCB Part Number: C304244; Supplier 1: LCSC; Category: Ferrite Beads; Supplier Part Number 1: C304244; Tolerance: ±25%; Rated Current: 300mA; DC Resistance: 200mΩ; RoHS: Yes; ComponentLink1Description: Datasheet; ComponentLink1URL: https://wmsc.lcsc.com/wmsc/upload/file/pdf/v2/lcsc/2009171410_TAI-TECH-FCM1005KF-300T07_C304244.pdf; ComponentLink2Description: JLCPCB Part URL; ComponentLink2URL: https://jlcpcb.com/partdetail/C304244; ComponentLink3Description: LCSC Part URL; ComponentLink3URL: https://lcsc.com/product-detail/Ferrite-Beads_TAI-TECH-TAI-TECH-FCM1005KF-300T07_C304244.html
footprint FB-0402 (0402 (1005M) Ferrite)
pins: 1, 2

## FCM1005KF-301T01
designator FB?  Impedance @ Frequency: 300Ω@100MHz
Ferrite, 300Ω@100MHz, ±25%, 500mΩ, 100mA, SMD 0402; Manufacturer: TAI-TECH; Manufacturer Part Number: FCM1005KF-301T01; Package Size: 0402; JLCPCB Basic Part: No; JLCPCB Part Number: C155046; Supplier 1: LCSC; Category: Ferrite Beads; Supplier Part Number 1: C155046; Tolerance: ±25%; Rated Current: 100mA; DC Resistance: 500mΩ; RoHS: Yes; ComponentLink1Description: Datasheet; ComponentLink1URL: https://wmsc.lcsc.com/wmsc/upload/file/pdf/v2/lcsc/2009171306_TAI-TECH-FCM1005KF-301T01_C155046.pdf; ComponentLink2Description: JLCPCB Part URL; ComponentLink2URL: https://jlcpcb.com/partdetail/C155046; ComponentLink3Description: LCSC Part URL; ComponentLink3URL: https://lcsc.com/product-detail/Ferrite-Beads_TAI-TECH-TAI-TECH-FCM1005KF-301T01_C155046.html
footprint FB-0402 (0402 (1005M) Ferrite)
pins: 1, 2

## FCM1005KF-301T08
designator FB?  Impedance @ Frequency: 300Ω@100MHz
Ferrite, 300Ω@100MHz, ±25%, 800mA, SMD 0402; Manufacturer: TAI-TECH; Manufacturer Part Number: FCM1005KF-301T08; Package Size: 0402; JLCPCB Basic Part: No; JLCPCB Part Number: C304245; Supplier 1: LCSC; Category: Ferrite Beads; Supplier Part Number 1: C304245; Tolerance: ±25%; Rated Current: 800mA; RoHS: Yes; ComponentLink1Description: Datasheet; ComponentLink1URL: https://wmsc.lcsc.com/wmsc/upload/file/pdf/v2/lcsc/2009171410_TAI-TECH-FCM1005KF-301T08_C304245.pdf; ComponentLink2Description: JLCPCB Part URL; ComponentLink2URL: https://jlcpcb.com/partdetail/C304245; ComponentLink3Description: LCSC Part URL; ComponentLink3URL: https://lcsc.com/product-detail/Ferrite-Beads_TAI-TECH-TAI-TECH-FCM1005KF-301T08_C304245.html
footprint FB-0402 (0402 (1005M) Ferrite)
pins: 1, 2

## FCM1005KF-470T05
designator FB?  Impedance @ Frequency: 47Ω@100MHz
Ferrite, 47Ω@100MHz, ±25%, 250mΩ, 500mA, SMD 0402; Manufacturer: TAI-TECH; Manufacturer Part Number: FCM1005KF-470T05; Package Size: 0402; JLCPCB Basic Part: No; JLCPCB Part Number: C356937; Supplier 1: LCSC; Category: Ferrite Beads; Supplier Part Number 1: C356937; Tolerance: ±25%; Rated Current: 500mA; DC Resistance: 250mΩ; RoHS: Yes; ComponentLink1Description: Datasheet; ComponentLink1URL: https://wmsc.lcsc.com/wmsc/upload/file/pdf/v2/lcsc/2009171137_TAI-TECH-FCM1005KF-470T05_C356937.pdf; ComponentLink2Description: JLCPCB Part URL; ComponentLink2URL: https://jlcpcb.com/partdetail/C356937; ComponentLink3Description: LCSC Part URL; ComponentLink3URL: https://lcsc.com/product-detail/Ferrite-Beads_TAI-TECH-TAI-TECH-FCM1005KF-470T05_C356937.html
footprint FB-0402 (0402 (1005M) Ferrite)
pins: 1, 2

## FCM1005KF-471T03
designator FB?  Impedance @ Frequency: 470Ω@100MHz
Ferrite, 470Ω@100MHz, ±25%, 650mΩ, 300mA, SMD 0402; Manufacturer: TAI-TECH; Manufacturer Part Number: FCM1005KF-471T03; Package Size: 0402; JLCPCB Basic Part: No; JLCPCB Part Number: C133928; Supplier 1: LCSC; Category: Ferrite Beads; Supplier Part Number 1: C133928; Tolerance: ±25%; Rated Current: 300mA; DC Resistance: 650mΩ; RoHS: Yes; ComponentLink1Description: Datasheet; ComponentLink1URL: https://wmsc.lcsc.com/wmsc/upload/file/pdf/v2/lcsc/2009171304_TAI-TECH-FCM1005KF-471T03_C133928.pdf; ComponentLink2Description: JLCPCB Part URL; ComponentLink2URL: https://jlcpcb.com/partdetail/C133928; ComponentLink3Description: LCSC Part URL; ComponentLink3URL: https://lcsc.com/product-detail/Ferrite-Beads_TAI-TECH-TAI-TECH-FCM1005KF-471T03_C133928.html
footprint FB-0402 (0402 (1005M) Ferrite)
pins: 1, 2

## FCM1005KF-600T03
designator FB?  Impedance @ Frequency: 60Ω@100MHz
Ferrite, 60Ω@100MHz, ±25%, 250mΩ, 300mA, SMD 0402; Manufacturer: TAI-TECH; Manufacturer Part Number: FCM1005KF-600T03; Package Size: 0402; JLCPCB Basic Part: No; JLCPCB Part Number: C155048; Supplier 1: LCSC; Category: Ferrite Beads; Supplier Part Number 1: C155048; Tolerance: ±25%; Rated Current: 300mA; DC Resistance: 250mΩ; RoHS: Yes; ComponentLink1Description: Datasheet; ComponentLink1URL: https://wmsc.lcsc.com/wmsc/upload/file/pdf/v2/lcsc/2009171306_TAI-TECH-FCM1005KF-600T03_C155048.pdf; ComponentLink2Description: JLCPCB Part URL; ComponentLink2URL: https://jlcpcb.com/partdetail/C155048; ComponentLink3Description: LCSC Part URL; ComponentLink3URL: https://lcsc.com/product-detail/Ferrite-Beads_TAI-TECH-TAI-TECH-FCM1005KF-600T03_C155048.html
footprint FB-0402 (0402 (1005M) Ferrite)
pins: 1, 2

## FCM1005KF-600T05
designator FB?  Impedance @ Frequency: 60Ω@100MHz
Ferrite, 60Ω@100MHz, ±25%, 250mΩ, 500mA, SMD 0402; Manufacturer: TAI-TECH; Manufacturer Part Number: FCM1005KF-600T05; Package Size: 0402; JLCPCB Basic Part: No; JLCPCB Part Number: C369536; Supplier 1: LCSC; Category: Ferrite Beads; Supplier Part Number 1: C369536; Tolerance: ±25%; Rated Current: 500mA; DC Resistance: 250mΩ; RoHS: Yes; ComponentLink1Description: Datasheet; ComponentLink1URL: https://wmsc.lcsc.com/wmsc/upload/file/pdf/v2/lcsc/2009171441_TAI-TECH-FCM1005KF-600T05_C369536.pdf; ComponentLink2Description: JLCPCB Part URL; ComponentLink2URL: https://jlcpcb.com/partdetail/C369536; ComponentLink3Description: LCSC Part URL; ComponentLink3URL: https://lcsc.com/product-detail/Ferrite-Beads_TAI-TECH-TAI-TECH-FCM1005KF-600T05_C369536.html
footprint FB-0402 (0402 (1005M) Ferrite)
pins: 1, 2

## FCM1005KF-600T08
designator FB?  Impedance @ Frequency: 60Ω@100MHz
Ferrite, 60Ω@100MHz, ±25%, 800mA, SMD 0402; Manufacturer: TAI-TECH; Manufacturer Part Number: FCM1005KF-600T08; Package Size: 0402; JLCPCB Basic Part: No; JLCPCB Part Number: C304246; Supplier 1: LCSC; Category: Ferrite Beads; Supplier Part Number 1: C304246; Tolerance: ±25%; Rated Current: 800mA; RoHS: Yes; ComponentLink1Description: Datasheet; ComponentLink1URL: https://wmsc.lcsc.com/wmsc/upload/file/pdf/v2/lcsc/2009171410_TAI-TECH-FCM1005KF-600T08_C304246.pdf; ComponentLink2Description: JLCPCB Part URL; ComponentLink2URL: https://jlcpcb.com/partdetail/C304246; ComponentLink3Description: LCSC Part URL; ComponentLink3URL: https://lcsc.com/product-detail/Ferrite-Beads_TAI-TECH-TAI-TECH-FCM1005KF-600T08_C304246.html
footprint FB-0402 (0402 (1005M) Ferrite)
pins: 1, 2

## FCM1005KF-601T01
designator FB?  Impedance @ Frequency: 600Ω@100MHz
Ferrite, 600Ω@100MHz, ±25%, 800mΩ, 100mA, SMD 0402; Manufacturer: TAI-TECH; Manufacturer Part Number: FCM1005KF-601T01; Package Size: 0402; JLCPCB Basic Part: No; JLCPCB Part Number: C127285; Supplier 1: LCSC; Category: Ferrite Beads; Supplier Part Number 1: C127285; Tolerance: ±25%; Rated Current: 100mA; DC Resistance: 800mΩ; RoHS: Yes; ComponentLink1Description: Datasheet; ComponentLink1URL: https://wmsc.lcsc.com/wmsc/upload/file/pdf/v2/lcsc/2009171134_TAI-TECH-FCM1005KF-601T01_C127285.pdf; ComponentLink2Description: JLCPCB Part URL; ComponentLink2URL: https://jlcpcb.com/partdetail/C127285; ComponentLink3Description: LCSC Part URL; ComponentLink3URL: https://lcsc.com/product-detail/Ferrite-Beads_TAI-TECH-TAI-TECH-FCM1005KF-601T01_C127285.html
footprint FB-0402 (0402 (1005M) Ferrite)
pins: 1, 2

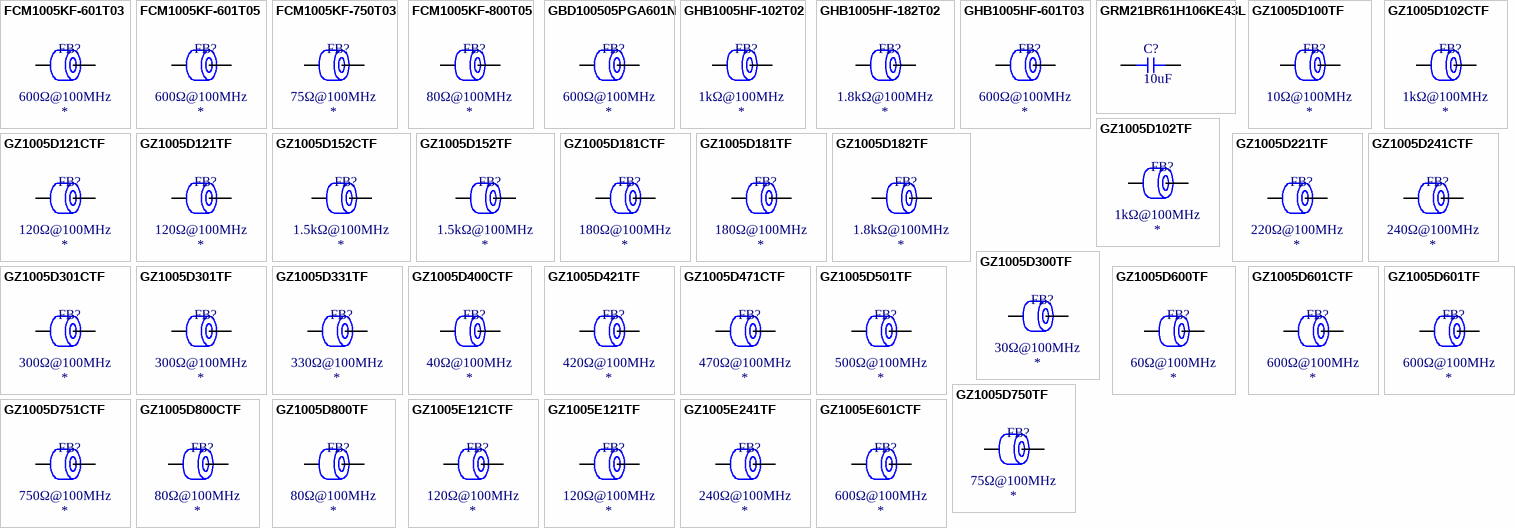
[diagram p13: symbols FCM1005KF-601T03 to GZ1005E601CTF]

## FCM1005KF-601T03
designator FB?  Impedance @ Frequency: 600Ω@100MHz
Ferrite, 600Ω@100MHz, ±25%, 800mΩ, 300mA, SMD 0402; Manufacturer: TAI-TECH; Manufacturer Part Number: FCM1005KF-601T03; Package Size: 0402; JLCPCB Basic Part: No; JLCPCB Part Number: C427432; Supplier 1: LCSC; Category: Ferrite Beads; Supplier Part Number 1: C427432; Tolerance: ±25%; Rated Current: 300mA; DC Resistance: 800mΩ; RoHS: Yes; ComponentLink1Description: Datasheet; ComponentLink1URL: https://wmsc.lcsc.com/wmsc/upload/file/pdf/v2/lcsc/2009171442_TAI-TECH-FCM1005KF-601T03_C427432.pdf; ComponentLink2Description: JLCPCB Part URL; ComponentLink2URL: https://jlcpcb.com/partdetail/C427432; ComponentLink3Description: LCSC Part URL; ComponentLink3URL: https://lcsc.com/product-detail/Ferrite-Beads_TAI-TECH-TAI-TECH-FCM1005KF-601T03_C427432.html
footprint FB-0402 (0402 (1005M) Ferrite)
pins: 1, 2

## FCM1005KF-601T05
designator FB?  Impedance @ Frequency: 600Ω@100MHz
Ferrite, 600Ω@100MHz, ±25%, 800mΩ, 500mA, SMD 0402; Manufacturer: TAI-TECH; Manufacturer Part Number: FCM1005KF-601T05; Package Size: 0402; JLCPCB Basic Part: No; JLCPCB Part Number: C133929; Supplier 1: LCSC; Category: Ferrite Beads; Supplier Part Number 1: C133929; Tolerance: ±25%; Rated Current: 500mA; DC Resistance: 800mΩ; RoHS: Yes; ComponentLink1Description: Datasheet; ComponentLink1URL: https://wmsc.lcsc.com/wmsc/upload/file/pdf/v2/lcsc/2009171304_TAI-TECH-FCM1005KF-601T05_C133929.pdf; ComponentLink2Description: JLCPCB Part URL; ComponentLink2URL: https://jlcpcb.com/partdetail/C133929; ComponentLink3Description: LCSC Part URL; ComponentLink3URL: https://lcsc.com/product-detail/Ferrite-Beads_TAI-TECH-TAI-TECH-FCM1005KF-601T05_C133929.html
footprint FB-0402 (0402 (1005M) Ferrite)
pins: 1, 2

## FCM1005KF-750T03
designator FB?  Impedance @ Frequency: 75Ω@100MHz
Ferrite, 75Ω@100MHz, ±25%, 250mΩ, 300mA, SMD 0402; Manufacturer: TAI-TECH; Manufacturer Part Number: FCM1005KF-750T03; Package Size: 0402; JLCPCB Basic Part: No; JLCPCB Part Number: C133926; Supplier 1: LCSC; Category: Ferrite Beads; Supplier Part Number 1: C133926; Tolerance: ±25%; Rated Current: 300mA; DC Resistance: 250mΩ; RoHS: Yes; ComponentLink1Description: Datasheet; ComponentLink1URL: https://wmsc.lcsc.com/wmsc/upload/file/pdf/v2/lcsc/2009171304_TAI-TECH-FCM1005KF-750T03_C133926.pdf; ComponentLink2Description: JLCPCB Part URL; ComponentLink2URL: https://jlcpcb.com/partdetail/C133926; ComponentLink3Description: LCSC Part URL; ComponentLink3URL: https://lcsc.com/product-detail/Ferrite-Beads_TAI-TECH-TAI-TECH-FCM1005KF-750T03_C133926.html
footprint FB-0402 (0402 (1005M) Ferrite)
pins: 1, 2

## FCM1005KF-800T05
designator FB?  Impedance @ Frequency: 80Ω@100MHz
Ferrite, 80Ω@100MHz, ±25%, 250mΩ, 500mA, SMD 0402; Manufacturer: TAI-TECH; Manufacturer Part Number: FCM1005KF-800T05; Package Size: 0402; JLCPCB Basic Part: No; JLCPCB Part Number: C369537; Supplier 1: LCSC; Category: Ferrite Beads; Supplier Part Number 1: C369537; Tolerance: ±25%; Rated Current: 500mA; DC Resistance: 250mΩ; RoHS: Yes; ComponentLink1Description: Datasheet; ComponentLink1URL: https://wmsc.lcsc.com/wmsc/upload/file/pdf/v2/lcsc/2009171441_TAI-TECH-FCM1005KF-800T05_C369537.pdf; ComponentLink2Description: JLCPCB Part URL; ComponentLink2URL: https://jlcpcb.com/partdetail/C369537; ComponentLink3Description: LCSC Part URL; ComponentLink3URL: https://lcsc.com/product-detail/Ferrite-Beads_TAI-TECH-TAI-TECH-FCM1005KF-800T05_C369537.html
footprint FB-0402 (0402 (1005M) Ferrite)
pins: 1, 2

## GBD100505PGA601N
designator FB?  Impedance @ Frequency: 600Ω@100MHz
Ferrite, 600Ω@100MHz, ±25%, 1Ω, 200mA, SMD 0402; Manufacturer: Gotrend Tech; Manufacturer Part Number: GBD100505PGA601N; Package Size: 0402; JLCPCB Basic Part: No; JLCPCB Part Number: C226163; Supplier 1: LCSC; Category: Ferrite Beads; Supplier Part Number 1: C226163; Tolerance: ±25%; Rated Current: 200mA; DC Resistance: 1Ω; RoHS: Yes; ComponentLink1Description: Datasheet; ComponentLink1URL: https://wmsc.lcsc.com/wmsc/upload/file/pdf/v2/lcsc/2304140030_Gotrend-Tech-GBD100505PGA601N_C226163.pdf; ComponentLink2Description: JLCPCB Part URL; ComponentLink2URL: https://jlcpcb.com/partdetail/C226163; ComponentLink3Description: LCSC Part URL; ComponentLink3URL: https://lcsc.com/product-detail/Ferrite-Beads_Gotrend-Tech-Gotrend-Tech-GBD100505PGA601N_C226163.html
footprint FB-0402 (0402 (1005M) Ferrite)
pins: 1, 2

## GHB1005HF-102T02
designator FB?  Impedance @ Frequency: 1kΩ@100MHz
Ferrite, 1kΩ@100MHz, ±25%, 1.25Ω, 250mA, SMD 0402; Manufacturer: TAI-TECH; Manufacturer Part Number: GHB1005HF-102T02; Package Size: 0402; JLCPCB Basic Part: No; JLCPCB Part Number: C356949; Supplier 1: LCSC; Category: Ferrite Beads; Supplier Part Number 1: C356949; Tolerance: ±25%; Rated Current: 250mA; DC Resistance: 1.25Ω; RoHS: Yes; ComponentLink1Description: Datasheet; ComponentLink1URL: https://wmsc.lcsc.com/wmsc/upload/file/pdf/v2/lcsc/2009171137_TAI-TECH-GHB1005HF-102T02_C356949.pdf; ComponentLink2Description: JLCPCB Part URL; ComponentLink2URL: https://jlcpcb.com/partdetail/C356949; ComponentLink3Description: LCSC Part URL; ComponentLink3URL: https://lcsc.com/product-detail/Ferrite-Beads_TAI-TECH-TAI-TECH-GHB1005HF-102T02_C356949.html
footprint FB-0402 (0402 (1005M) Ferrite)
pins: 1, 2

## GHB1005HF-182T02
designator FB?  Impedance @ Frequency: 1.8kΩ@100MHz
Ferrite, 1.8kΩ@100MHz, ±25%, 2Ω, 200mA, SMD 0402; Manufacturer: TAI-TECH; Manufacturer Part Number: GHB1005HF-182T02; Package Size: 0402; JLCPCB Basic Part: No; JLCPCB Part Number: C356950; Supplier 1: LCSC; Category: Ferrite Beads; Supplier Part Number 1: C356950; Tolerance: ±25%; Rated Current: 200mA; DC Resistance: 2Ω; RoHS: Yes; ComponentLink1Description: Datasheet; ComponentLink1URL: https://wmsc.lcsc.com/wmsc/upload/file/pdf/v2/lcsc/2009171137_TAI-TECH-GHB1005HF-182T02_C356950.pdf; ComponentLink2Description: JLCPCB Part URL; ComponentLink2URL: https://jlcpcb.com/partdetail/C356950; ComponentLink3Description: LCSC Part URL; ComponentLink3URL: https://lcsc.com/product-detail/Ferrite-Beads_TAI-TECH-TAI-TECH-GHB1005HF-182T02_C356950.html
footprint FB-0402 (0402 (1005M) Ferrite)
pins: 1, 2

## GHB1005HF-601T03
designator FB?  Impedance @ Frequency: 600Ω@100MHz
Ferrite, 600Ω@100MHz, ±25%, 850mΩ, 300mA, SMD 0402; Manufacturer: TAI-TECH; Manufacturer Part Number: GHB1005HF-601T03; Package Size: 0402; JLCPCB Basic Part: No; JLCPCB Part Number: C356951; Supplier 1: LCSC; Category: Ferrite Beads; Supplier Part Number 1: C356951; Tolerance: ±25%; Rated Current: 300mA; DC Resistance: 850mΩ; RoHS: Yes; ComponentLink1Description: Datasheet; ComponentLink1URL: https://wmsc.lcsc.com/wmsc/upload/file/pdf/v2/lcsc/2009171137_TAI-TECH-GHB1005HF-601T03_C356951.pdf; ComponentLink2Description: JLCPCB Part URL; ComponentLink2URL: https://jlcpcb.com/partdetail/C356951; ComponentLink3Description: LCSC Part URL; ComponentLink3URL: https://lcsc.com/product-detail/Ferrite-Beads_TAI-TECH-TAI-TECH-GHB1005HF-601T03_C356951.html
footprint FB-0402 (0402 (1005M) Ferrite)
pins: 1, 2

## GRM21BR61H106KE43L
designator C?  Capacitance: 10uF  (hidden comment: *)
Capacitor, Ceramic (MLCC), 10uF, ±10%, 50V, X5R, ±10%, SMD 0805; Manufacturer: Murata Electronics; Manufacturer Part Number: GRM21BR61H106KE43L; Package Size: 0805; JLCPCB Basic Part: Yes; JLCPCB Part Number: C440198; Supplier 1: LCSC; Category: Capacitors - MLCC; Supplier Part Number 1: C440198; Tolerance: ±10%; Voltage Rating: 50V; Temperature Coefficient: X5R; RoHS: Yes; ComponentLink1Description: Datasheet; ComponentLink1URL: https://wmsc.lcsc.com/wmsc/upload/file/pdf/v2/lcsc/2310251059_Murata-Electronics-GRM21BR61H106KE43L_C440198.pdf; ComponentLink2Description: JLCPCB Part URL; ComponentLink2URL: https://jlcpcb.com/partdetail/C440198; ComponentLink3Description: LCSC Part URL; ComponentLink3URL: https://lcsc.com/product-detail/Multilayer-Ceramic-Capacitors-MLCC---SMD-SMT_Murata-Electronics-Murata-Electronics-GRM21BR61H106KE43L_C440198.html
footprint CAP-0805 (0805 (2012M) Capacitor)
pins: 1, 2

## GZ1005D100TF
designator FB?  Impedance @ Frequency: 10Ω@100MHz
Ferrite, 10Ω@100MHz, 50mΩ, 500mA, SMD 0402; Manufacturer: Sunlord; Manufacturer Part Number: GZ1005D100TF; Package Size: 0402; JLCPCB Basic Part: No; JLCPCB Part Number: C37654; Supplier 1: LCSC; Category: Ferrite Beads; Supplier Part Number 1: C37654; Rated Current: 500mA; DC Resistance: 50mΩ; RoHS: Yes; ComponentLink1Description: Datasheet; ComponentLink1URL: https://wmsc.lcsc.com/wmsc/upload/file/pdf/v2/lcsc/2310301640_Sunlord-GZ1005D100TF_C37654.pdf; ComponentLink2Description: JLCPCB Part URL; ComponentLink2URL: https://jlcpcb.com/partdetail/C37654; ComponentLink3Description: LCSC Part URL; ComponentLink3URL: https://lcsc.com/product-detail/Ferrite-Beads_Sunlord-Sunlord-GZ1005D100TF_C37654.html
footprint FB-0402 (0402 (1005M) Ferrite)
pins: 1, 2

## GZ1005D102CTF
designator FB?  Impedance @ Frequency: 1kΩ@100MHz
Ferrite, 1kΩ@100MHz, ±25%, 700mΩ, 150mA, SMD 0402; Manufacturer: Sunlord; Manufacturer Part Number: GZ1005D102CTF; Package Size: 0402; JLCPCB Basic Part: No; JLCPCB Part Number: C96679; Supplier 1: LCSC; Category: Ferrite Beads; Supplier Part Number 1: C96679; Tolerance: ±25%; Rated Current: 150mA; DC Resistance: 700mΩ; RoHS: Yes; ComponentLink1Description: Datasheet; ComponentLink1URL: https://wmsc.lcsc.com/wmsc/upload/file/pdf/v2/lcsc/2310301640_Sunlord-GZ1005D102CTF_C96679.pdf; ComponentLink2Description: JLCPCB Part URL; ComponentLink2URL: https://jlcpcb.com/partdetail/C96679; ComponentLink3Description: LCSC Part URL; ComponentLink3URL: https://lcsc.com/product-detail/Ferrite-Beads_Sunlord-Sunlord-GZ1005D102CTF_C96679.html
footprint FB-0402 (0402 (1005M) Ferrite)
pins: 1, 2